# Altium schematic symbol library bzx384-c10,115.SchLib: 1 symbol
Pins are listed as number, name and electrical type; pins without a type are passive.

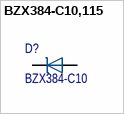
[diagram p0: symbol BZX384-C10,115]

## BZX384-C10,115
designator D?, comment BZX384-C10
Diode Zener Single 10V 5% 300mW 2-Pin SOD-323 T/R; Manufacturer: Nexperia; Manufacturer Part Number: BZX384-C10,115; Manufacturer Lifecycle Status: RELEASED FOR SUPPLY; Collector Emitter Breakdown Voltage: 32V; Collector Emitter Saturation Voltage: -300mV; ESD Protection: No; hFE Min: 215; Impedance: 20Ω; Max Collector Current: 100mA; Max Reverse Leakage Current: 200nA; Number of Elements: 1; Polarity: Unidirectional; Reverse Standoff Voltage: 7V; Test Current: 5mA; Supplier: RS; Supplier Part Number: 1787095; RoHS: Compliant; Category: Zener Diodes; Stock: 23400; Case/Package: SC; China RoHS: Compliant; Composition: Zener; Contact Plating: Tin; Country of Origin: Mainland China; Export Control Classification Number (ECCN) Code: EAR99; Element Configuration: Single; Height: 1.05mm; Harmonized Tariff Schedule (HTS) Code: 8541.10.00.50; Introduction Date: 2004-03-23; Lead Free: Lead Free; Length: 1.8mm; Lifecycle Status: Production; Max Operating Temperature: 150°C; Max Power Dissipation: 300mW; Min Operating Temperature: -65°C; Mounting Technology: Surface Mount; Pins: 2; Number of Terminals: 2; Peak Reverse Current: 200nA; Power Dissipation: 300mW; Radiation Hardening: No; Ratings: AEC-Q101; REACH SVHC: Unaffected; Reference Voltage: 10V; Schedule B: 8541100050, 8541100050|8541100050|8541100050|8541100050|8541100050; Termination: SMD/SMT; Tolerance: 5%; Voltage Tolerance: 5%; Weight: 4.535924g; Width: 1.35mm; Zener Current: 5mA; Zener Voltage: 10V; ComponentLink1URL: https://datasheet.octopart.com:443/BZX384-C10%2C115-Nexperia-datasheet-8360268.pdf?src-supplier=IHS; ComponentLink1Description: https://datasheet.octopart.com:443/BZX384-C10%2C115-Nexperia-datasheet-8360268.pdf?src-supplier=IHS; ComponentLink2URL: https://datasheet.octopart.com:443/BZX384-C10%2C115-Nexperia-datasheet-155662751.pdf?src-supplier=Newark; ComponentLink2Description: https://datasheet.octopart.com:443/BZX384-C10%2C115-Nexperia-datasheet-155662751.pdf?src-supplier=Newark; ComponentLink3URL: https://datasheet.octopart.com:443/BZX384-C10%2C115-NXP-Semiconductors-datasheet-10052903.pdf?src-supplier=Newark; ComponentLink3Description: https://datasheet.octopart.com:443/BZX384-C10%2C115-NXP-Semiconductors-datasheet-10052903.pdf?src-supplier=Newark; ComponentLink4URL: https://datasheet.octopart.com:443/BZX384-C10%2C115-Nexperia-datasheet-79471522.pdf?src-supplier=LKR; ComponentLink4Description: https://datasheet.octopart.com:443/BZX384-C10%2C115-Nexperia-datasheet-79471522.pdf?src-supplier=LKR; ComponentLink5URL: https://datasheet.octopart.com:443/BZX384-C10%2C115-Nexperia-datasheet-68321567.pdf?src-supplier=element14+APAC; ComponentLink5Description: https://datasheet.octopart.com:443/BZX384-C10%2C115-Nexperia-datasheet-68321567.pdf?src-supplier=element14+APAC; ComponentLink6URL: https://datasheet.octopart.com:443/BZX384-C10%2C115-Nexperia-datasheet-105678879.pdf?src-supplier=TME; ComponentLink6Description: https://datasheet.octopart.com:443/BZX384-C10%2C115-Nexperia-datasheet-105678879.pdf?src-supplier=TME; ComponentLink7URL: https://datasheet.octopart.com:443/BZX384-C10%2C115-Nexperia-datasheet-194695641.pdf?src-supplier=HQonline; ComponentLink7Description: https://datasheet.octopart.com:443/BZX384-C10%2C115-Nexperia-datasheet-194695641.pdf?src-supplier=HQonline; ComponentLink8URL: http://sigma.octopart.com:80/reach_statement/NXP-Semiconductors-company-13.pdf?src-supplier=Compliance+Statements; ComponentLink8Description: http://sigma.octopart.com:80/reach_statement/NXP-Semiconductors-company-13.pdf?src-supplier=Compliance+Statements; ComponentLink9URL: http://sigma.octopart.com:80/rohs_statement/NXP-Semiconductors-company-12.pdf?src-supplier=Compliance+Statements; ComponentLink9Description: http://sigma.octopart.com:80/rohs_statement/NXP-Semiconductors-company-12.pdf?src-supplier=Compliance+Statements
footprint sod-323 (SOD-323, 2 leads, 1.7x1.25x1.1 mm)
pins: 1, 2